# Altium footprint library chipfc_libs.PCBLIB: 315 footprints (part 15 of 20)
Each footprint in its own frame and in the unit in brackets; x right, y up, seen from the top. Pads: shape width x height; smd on the part's side, far side on the other; paste and mask are expansions set on the pad; w line width, h text height; cw(c..) or ccw(c..) is an arc to the next point about the centre after c.
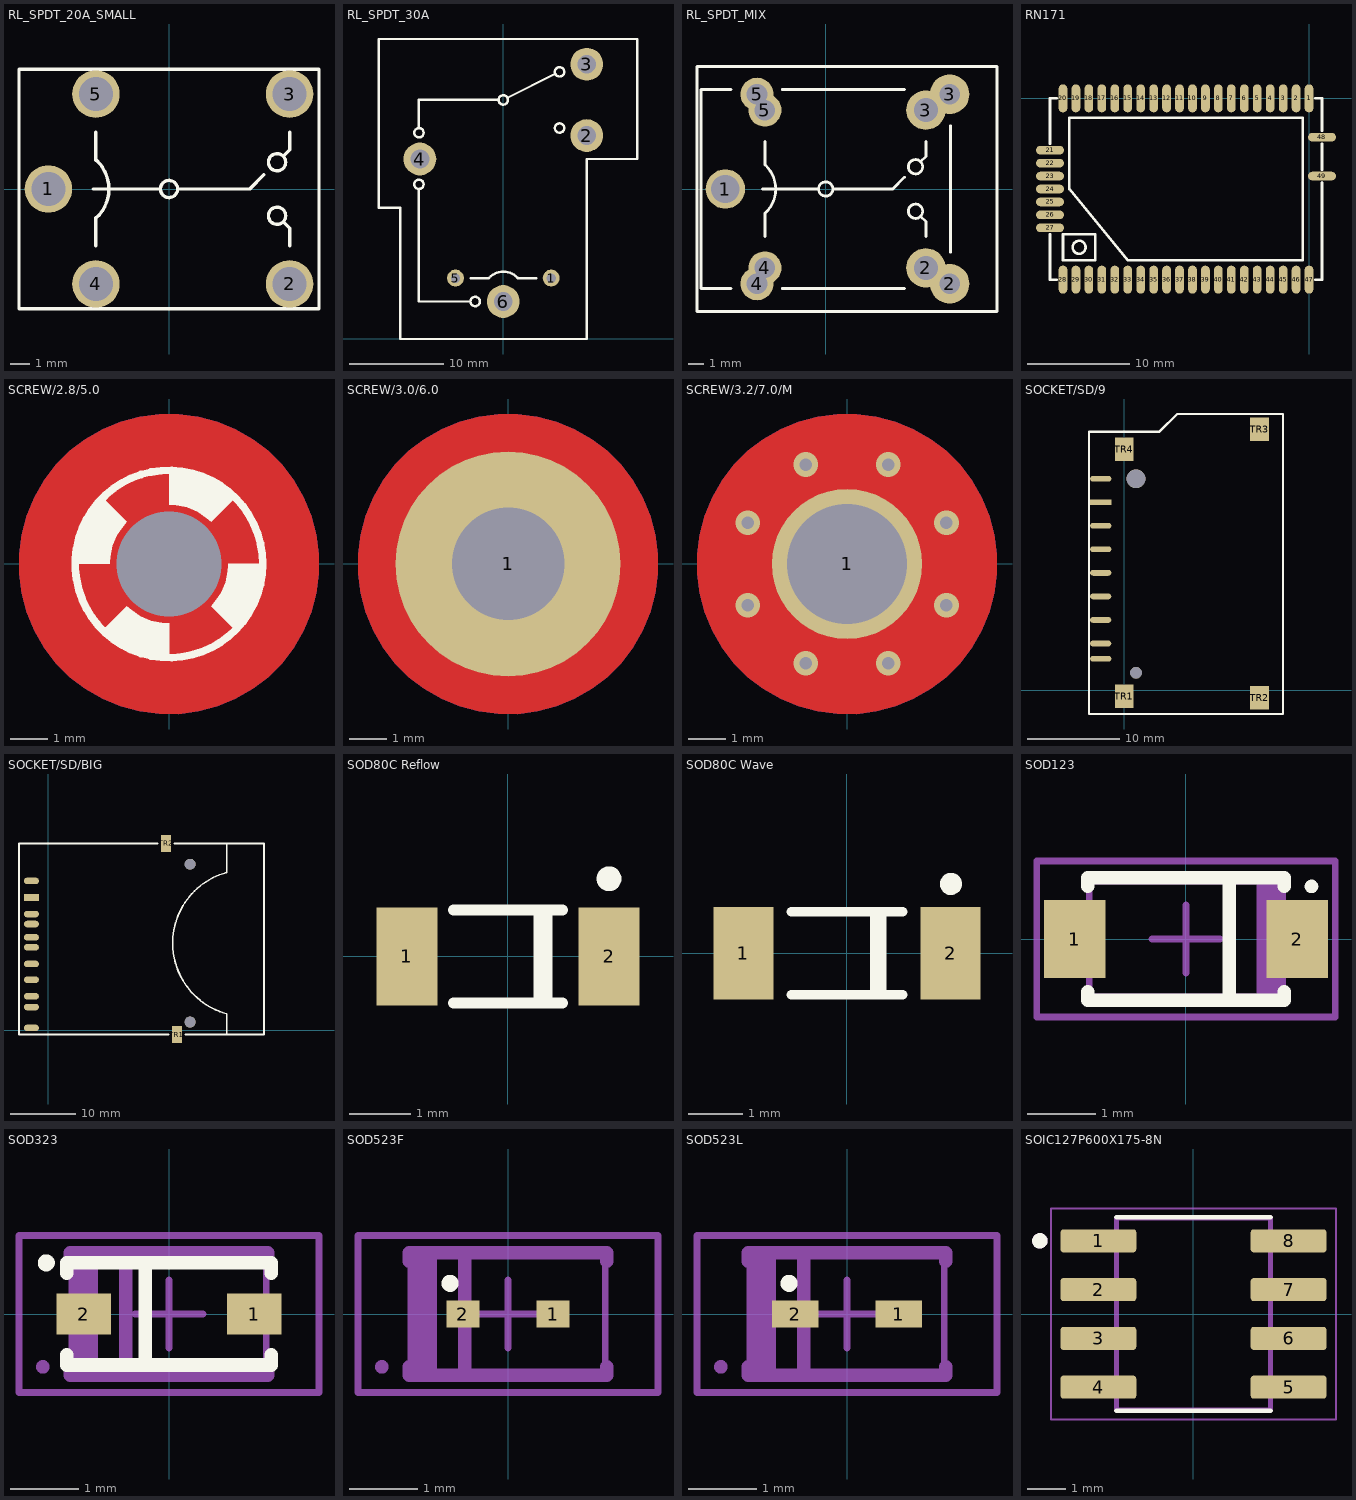
[diagram p14: the footprints below, top view; thin cyan lines are the x and y axes]

## RL_SPDT_20A_SMALL [mm]
height 20.32
pads (5):
  round 2.5 hole 1.8: 1(-6.35,0) 2(6.35,-5) 3(6.35,5) 4(-3.85,-5) 5(-3.85,5)
Top Overlay:
  circle w0.178: c5.69,1.409 r0.452
  circle w0.178: c5.69,-1.409 r0.452
  circle w0.178: c0,0 r0.452
  lines w0.178: -4,0 -0.45,0 ; -3.85,-3 -3.85,-1.523 ; -3.85,1.523 -3.85,3 ; -3.828,-1.523 ccw(c-5.25,0) -3.817,1.513 ; 0.45,0 4.25,0 5,0.75 ; 6.015,-1.735 6.35,-2.07 6.35,-3 ; 6.015,1.735 6.35,2.07 6.35,3 ; -7.9,-6.3 7.9,-6.3 7.9,6.3 -7.9,6.3 -7.9,-6.3
3D body "SRA-05VDC-CL.stp": height 13.5, standoff -5, extent -7.75,-6.15 7.75,6.15

## RL_SPDT_30A [mm] "Relay SPDT, 5 pin, 10A,W 650mil, L 800mil, H 800mil"
height 20.32
pads (6):
  round 1.8 hole 1: 1(5.1,6.5) 5(-5.1,6.5)
  round 3.5 hole 2: 2(8.9,21.7) 3(8.9,29.3) 4(-8.9,19.2) 6(0,4)
Top Overlay:
  circle w0.254: c6,22.5 r0.5
  circle w0.254: c0,25.5 r0.5
  circle w0.254: c6,28.5 r0.5
  circle w0.254: c-3,4 r0.5
  circle w0.254: c-9,16.5 r0.5
  circle w0.254: c-9,22 r0.5
  lines w0.254: -9,16 -9,4 -3.5,4 ; -9,22.5 -9,25.5 -0.5,25.5 ; -3.5,6.5 -1.523,6.5 ; -1.513,6.533 cw(c0,5.1) 1.523,6.522 ; 0.5,25.75 5.5,28.25 ; 1.523,6.5 3.5,6.5 ; -13.3,14 -13.3,32 14.3,32 14.3,19.2 8.9,19.2 8.9,0 -11,0 -11,14 -13.3,14
3D body "User Library-Releu Songle.step": height 20.06, standoff -4, extent -13.5,0 13.5,32

## RL_SPDT_MIX [mm]
height 20.32
pads (9):
  round 2.5 hole 1.8: 1(-6.35,0)
  round 2.5 hole 1.5: 2(6.35,-5) 3(6.35,5)
  round 2.5 hole 1.3: 2(7.85,-6) 3(7.85,6)
  round 2.1 hole 1.3: 4(-4.35,-6) 4(-3.85,-5) 5(-4.35,6) 5(-3.85,5)
Top Overlay:
  circle w0.178: c5.69,1.409 r0.452
  circle w0.178: c5.69,-1.409 r0.452
  circle w0.178: c0,0 r0.452
  lines w0.178: -6,-6.3 -7.9,-6.3 -7.9,6.3 -6,6.3 ; -4,0 -0.45,0 ; -3.85,-3 -3.85,-1.523 ; -3.85,1.523 -3.85,3 ; -3.828,-1.523 ccw(c-5.25,0) -3.817,1.513 ; -2.75,-6.3 5,-6.3 ; -2.75,6.3 5,6.3 ; 0.45,0 4.25,0 5,0.75 ; 6.015,-1.735 6.35,-2.07 6.35,-3 ; 6.015,1.735 6.35,2.07 6.35,3 ; 7.9,-4 7.9,4 ; -8.15,-7.75 -8.15,7.75 10.85,7.75 10.85,-7.75 -8.15,-7.75
3D body "SRA-05VDC-CL.stp": height 13.5, standoff -5, extent -7.75,-6.15 7.75,6.15
3D body "User Library-Relay SPDT.step": height 15.4, standoff -4, extent -8.15,-7.75 10.85,7.75

## RN171 [mm] "RN-171 802.11 b/g Wireless LAN Module"
height 3.2
pads (49):
  oval 0.85x2.75 smd: 1(0,0) 2(-1.27,0) 3(-2.54,0) 4(-3.81,0) 5(-5.08,0) 6(-6.35,0) 7(-7.62,0) 8(-8.89,0) 9(-10.16,0) 10(-11.43,0) 11(-12.7,0) 12(-13.97,0) 13(-15.24,0) 14(-16.51,0) 15(-17.78,0) 16(-19.05,0) 17(-20.32,0) 18(-21.59,0) 19(-22.86,0) 20(-24.13,0) 28(-24.13,-17.78) 29(-22.86,-17.78) 30(-21.59,-17.78) 31(-20.32,-17.78) 32(-19.05,-17.78) 33(-17.78,-17.78) 34(-16.51,-17.78) 35(-15.24,-17.78) 36(-13.97,-17.78) 37(-12.7,-17.78) 38(-11.43,-17.78) 39(-10.16,-17.78) 40(-8.89,-17.78) 41(-7.62,-17.78) 42(-6.35,-17.78) 43(-5.08,-17.78) 44(-3.81,-17.78) 45(-2.54,-17.78) 46(-1.27,-17.78) 47(0,-17.78)
  oval 2.75x0.85 smd: 21(-25.4,-5.08) 22(-25.4,-6.35) 23(-25.4,-7.62) 24(-25.4,-8.89) 25(-25.4,-10.16) 26(-25.4,-11.43) 27(-25.4,-12.7) 48(1.27,-3.81) 49(1.27,-7.62)
Top Overlay:
  circle w0.254: c-22.543,-14.605 r0.635
  lines w0.254: -25.4,-13.335 -25.4,-17.78 -24.765,-17.78 ; -25.4,-4.445 -25.4,0 -24.765,0 ; 0.635,-17.78 1.27,-17.78 1.27,-8.255 ; 0.635,0 1.27,0 1.27,-3.175 ; 1.27,-6.985 1.27,-4.445 ; -24.13,-15.875 -20.955,-15.875 -20.955,-13.335 -24.13,-13.335 -24.13,-13.97 -24.13,-15.875 ; -23.495,-8.89 -23.495,-1.905 -0.635,-1.905 -0.635,-15.875 -17.78,-15.875 -23.495,-8.89
3D body "User Library-RN-171.step": height 4.39, standoff -0.3, extent -25.4,-17.78 1.27,0

## SCREW/2.8/5.0 [mm]
pads (1):
  round 0 hole 2.8 unplated: 1(0,0)
Top Layer:
  pour cut-out: -4,0 -4,0.262 -3.932,0.782 -3.796,1.289 -3.595,1.773 -3.333,2.227 -3.014,2.643 -2.643,3.014 -2.227,3.333 -1.773,3.595 -1.289,3.796 -0.782,3.931 -0.262,4 0,4 0.262,4 0.782,3.932 1.288,3.796 1.773,3.595 2.227,3.333 2.643,3.014 3.014,2.643 3.333,2.227 3.595,1.773 3.796,1.288 3.932,0.782 4,0.262 4,0 4,-0.262 3.932,-0.782 3.796,-1.289 3.595,-1.773 3.333,-2.227 3.014,-2.643 2.643,-3.014 2.227,-3.333 1.773,-3.595 1.289,-3.796 0.782,-3.932 0.262,-4 0,-4 -0.262,-4 -0.782,-3.932 -1.288,-3.796 -1.773,-3.595 -2.227,-3.333 -2.643,-3.014 -3.014,-2.643 -3.333,-2.227 -3.595,-1.773 -3.796,-1.289 -3.932,-0.782 -4,-0.262
Bottom Layer:
  pour cut-out: -4,0 -4,0.262 -3.932,0.782 -3.796,1.289 -3.595,1.773 -3.333,2.227 -3.014,2.643 -2.643,3.014 -2.227,3.333 -1.773,3.595 -1.289,3.796 -0.782,3.931 -0.262,4 0,4 0.262,4 0.782,3.932 1.288,3.796 1.773,3.595 2.227,3.333 2.643,3.014 3.014,2.643 3.333,2.227 3.595,1.773 3.796,1.288 3.932,0.782 4,0.262 4,0 4,-0.262 3.932,-0.782 3.796,-1.289 3.595,-1.773 3.333,-2.227 3.014,-2.643 2.643,-3.014 2.227,-3.333 1.773,-3.595 1.289,-3.796 0.782,-3.932 0.262,-4 0,-4 -0.262,-4 -0.782,-3.932 -1.288,-3.796 -1.773,-3.595 -2.227,-3.333 -2.643,-3.014 -3.014,-2.643 -3.333,-2.227 -3.595,-1.773 -3.796,-1.289 -3.932,-0.782 -4,-0.262
Top Overlay:
  circle w0.203: c0,0 r2.5
  region: 2.5,0 2.5,-0.025 2.5,-0.268 2.405,-0.747 2.218,-1.197 1.947,-1.603 1.775,-1.775 1.125,-1.125 1.226,-1.013 1.394,-0.763 1.509,-0.485 1.568,-0.189 1.575,-0.039 1.575,0
  region: 0,-2.5 -0.025,-2.5 -0.268,-2.5 -0.747,-2.405 -1.197,-2.218 -1.603,-1.947 -1.775,-1.775 -1.125,-1.125 -1.013,-1.226 -0.763,-1.394 -0.485,-1.509 -0.189,-1.568 -0.039,-1.575 0,-1.575
  region: -2.5,0 -2.5,0.025 -2.5,0.268 -2.405,0.747 -2.218,1.197 -1.947,1.603 -1.775,1.775 -1.125,1.125 -1.226,1.013 -1.394,0.763 -1.509,0.485 -1.568,0.189 -1.575,0.039 -1.575,0
  region: 0,2.5 0.025,2.5 0.268,2.5 0.747,2.405 1.197,2.218 1.603,1.947 1.775,1.775 1.125,1.125 1.013,1.226 0.763,1.394 0.485,1.509 0.189,1.568 0.039,1.575 0,1.575
Bottom Overlay:
  circle w0.203: c0,0 r2.5
  region: -2.5,0 -2.5,-0.025 -2.5,-0.268 -2.405,-0.747 -2.218,-1.197 -1.947,-1.603 -1.775,-1.775 -1.125,-1.125 -1.226,-1.013 -1.394,-0.763 -1.509,-0.485 -1.568,-0.189 -1.575,-0.039 -1.575,0
  region: 0,2.5 -0.025,2.5 -0.268,2.5 -0.747,2.405 -1.197,2.218 -1.603,1.947 -1.775,1.775 -1.125,1.125 -1.013,1.226 -0.763,1.394 -0.485,1.509 -0.189,1.568 -0.039,1.575 0,1.575
  region: 2.5,0 2.5,0.025 2.5,0.268 2.405,0.747 2.218,1.197 1.947,1.603 1.775,1.775 1.125,1.125 1.226,1.013 1.394,0.763 1.509,0.485 1.568,0.189 1.575,0.039 1.575,0
  region: 0,-2.5 0.025,-2.5 0.268,-2.5 0.747,-2.405 1.197,-2.218 1.603,-1.947 1.775,-1.775 1.125,-1.125 1.013,-1.226 0.763,-1.394 0.485,-1.509 0.189,-1.568 0.039,-1.575 0,-1.575

## SCREW/3.0/6.0 [mm]
pads (1):
  round 6 hole 3: 1(0,0)
Top Layer:
  pour cut-out: -4,0 -4,0.262 -3.932,0.782 -3.796,1.289 -3.595,1.773 -3.333,2.227 -3.014,2.643 -2.643,3.014 -2.227,3.333 -1.773,3.595 -1.289,3.796 -0.782,3.931 -0.262,4 0,4 0.262,4 0.782,3.932 1.288,3.796 1.773,3.595 2.227,3.333 2.643,3.014 3.014,2.643 3.333,2.227 3.595,1.773 3.796,1.288 3.932,0.782 4,0.262 4,0 4,-0.262 3.932,-0.782 3.796,-1.289 3.595,-1.773 3.333,-2.227 3.014,-2.643 2.643,-3.014 2.227,-3.333 1.773,-3.595 1.289,-3.796 0.782,-3.932 0.262,-4 0,-4 -0.262,-4 -0.782,-3.932 -1.288,-3.796 -1.773,-3.595 -2.227,-3.333 -2.643,-3.014 -3.014,-2.643 -3.333,-2.227 -3.595,-1.773 -3.796,-1.289 -3.932,-0.782 -4,-0.262
Bottom Layer:
  pour cut-out: -4,0 -4,0.262 -3.932,0.782 -3.796,1.289 -3.595,1.773 -3.333,2.227 -3.014,2.643 -2.643,3.014 -2.227,3.333 -1.773,3.595 -1.289,3.796 -0.782,3.931 -0.262,4 0,4 0.262,4 0.782,3.932 1.288,3.796 1.773,3.595 2.227,3.333 2.643,3.014 3.014,2.643 3.333,2.227 3.595,1.773 3.796,1.288 3.932,0.782 4,0.262 4,0 4,-0.262 3.932,-0.782 3.796,-1.289 3.595,-1.773 3.333,-2.227 3.014,-2.643 2.643,-3.014 2.227,-3.333 1.773,-3.595 1.289,-3.796 0.782,-3.932 0.262,-4 0,-4 -0.262,-4 -0.782,-3.932 -1.288,-3.796 -1.773,-3.595 -2.227,-3.333 -2.643,-3.014 -3.014,-2.643 -3.333,-2.227 -3.595,-1.773 -3.796,-1.289 -3.932,-0.782 -4,-0.262

## SCREW/3.2/7.0/M [mm]
pads (1):
  round 4 / inner round 7 / far side round 7 hole 3.2: 1(0,0)
via -1.1,-2.65 diameter 0.66 hole 0.33
via 2.65,-1.1 diameter 0.66 hole 0.33
via 1.1,2.65 diameter 0.66 hole 0.33
via -2.65,1.1 diameter 0.66 hole 0.33
via 2.65,1.1 diameter 0.66 hole 0.33
via -1.1,2.65 diameter 0.66 hole 0.33
via -2.65,-1.1 diameter 0.66 hole 0.33
via 1.1,-2.65 diameter 0.66 hole 0.33
Top Layer:
  pour cut-out: -4,0 -4,0.262 -3.932,0.782 -3.796,1.289 -3.595,1.773 -3.333,2.227 -3.014,2.643 -2.643,3.014 -2.227,3.333 -1.773,3.595 -1.289,3.796 -0.782,3.931 -0.262,4 0,4 0.262,4 0.782,3.932 1.288,3.796 1.773,3.595 2.227,3.333 2.643,3.014 3.014,2.643 3.333,2.227 3.595,1.773 3.796,1.288 3.932,0.782 4,0.262 4,0 4,-0.262 3.932,-0.782 3.796,-1.289 3.595,-1.773 3.333,-2.227 3.014,-2.643 2.643,-3.014 2.227,-3.333 1.773,-3.595 1.289,-3.796 0.782,-3.932 0.262,-4 0,-4 -0.262,-4 -0.782,-3.932 -1.288,-3.796 -1.773,-3.595 -2.227,-3.333 -2.643,-3.014 -3.014,-2.643 -3.333,-2.227 -3.595,-1.773 -3.796,-1.289 -3.932,-0.782 -4,-0.262
  region: -0.1,-2.25 -0.325,-2.225 -0.575,-2.175 -0.8,-2.1 -0.975,-2.025 -1.125,-1.95 -1.25,-1.875 -1.375,-1.775 -1.5,-1.675 -2.425,-2.6 -2.225,-2.775 -2.025,-2.925 -1.825,-3.05 -1.6,-3.175 -1.375,-3.275 -1.175,-3.35 -0.95,-3.425 -0.725,-3.475 -0.6,-3.5 -0.45,-3.525 -0.1,-3.55
  region: 0.1,-2.25 0.325,-2.225 0.575,-2.175 0.8,-2.1 0.975,-2.025 1.125,-1.95 1.25,-1.875 1.375,-1.775 1.5,-1.675 2.425,-2.6 2.225,-2.775 2.025,-2.925 1.825,-3.05 1.6,-3.175 1.375,-3.275 1.175,-3.35 0.95,-3.425 0.725,-3.475 0.6,-3.5 0.45,-3.525 0.1,-3.55
  region: 2.25,0.1 2.225,0.325 2.175,0.575 2.1,0.8 2.025,0.975 1.95,1.125 1.875,1.25 1.775,1.375 1.675,1.5 2.6,2.425 2.775,2.225 2.925,2.025 3.05,1.825 3.175,1.6 3.275,1.375 3.35,1.175 3.425,0.95 3.475,0.725 3.5,0.6 3.525,0.45 3.55,0.1
  region: 2.25,-0.1 2.225,-0.325 2.175,-0.575 2.1,-0.8 2.025,-0.975 1.95,-1.125 1.875,-1.25 1.775,-1.375 1.675,-1.5 2.6,-2.425 2.775,-2.225 2.925,-2.025 3.05,-1.825 3.175,-1.6 3.275,-1.375 3.35,-1.175 3.425,-0.95 3.475,-0.725 3.5,-0.6 3.525,-0.45 3.55,-0.1
  region: 0.1,2.25 0.325,2.225 0.575,2.175 0.8,2.1 0.975,2.025 1.125,1.95 1.25,1.875 1.375,1.775 1.5,1.675 2.425,2.6 2.225,2.775 2.025,2.925 1.825,3.05 1.6,3.175 1.375,3.275 1.175,3.35 0.95,3.425 0.725,3.475 0.6,3.5 0.45,3.525 0.1,3.55
  region: -0.1,2.25 -0.325,2.225 -0.575,2.175 -0.8,2.1 -0.975,2.025 -1.125,1.95 -1.25,1.875 -1.375,1.775 -1.5,1.675 -2.425,2.6 -2.225,2.775 -2.025,2.925 -1.825,3.05 -1.6,3.175 -1.375,3.275 -1.175,3.35 -0.95,3.425 -0.725,3.475 -0.6,3.5 -0.45,3.525 -0.1,3.55
  region: -2.25,-0.1 -2.225,-0.325 -2.175,-0.575 -2.1,-0.8 -2.025,-0.975 -1.95,-1.125 -1.875,-1.25 -1.775,-1.375 -1.675,-1.5 -2.6,-2.425 -2.775,-2.225 -2.925,-2.025 -3.05,-1.825 -3.175,-1.6 -3.275,-1.375 -3.35,-1.175 -3.425,-0.95 -3.475,-0.725 -3.5,-0.6 -3.525,-0.45 -3.55,-0.1
  region: -2.25,0.1 -2.225,0.325 -2.175,0.575 -2.1,0.8 -2.025,0.975 -1.95,1.125 -1.875,1.25 -1.775,1.375 -1.675,1.5 -2.6,2.425 -2.775,2.225 -2.925,2.025 -3.05,1.825 -3.175,1.6 -3.275,1.375 -3.35,1.175 -3.425,0.95 -3.475,0.725 -3.5,0.6 -3.525,0.45 -3.55,0.1
Bottom Layer:
  pour cut-out: -4,0 -4,0.262 -3.932,0.782 -3.796,1.289 -3.595,1.773 -3.333,2.227 -3.014,2.643 -2.643,3.014 -2.227,3.333 -1.773,3.595 -1.289,3.796 -0.782,3.931 -0.262,4 0,4 0.262,4 0.782,3.932 1.288,3.796 1.773,3.595 2.227,3.333 2.643,3.014 3.014,2.643 3.333,2.227 3.595,1.773 3.796,1.288 3.932,0.782 4,0.262 4,0 4,-0.262 3.932,-0.782 3.796,-1.289 3.595,-1.773 3.333,-2.227 3.014,-2.643 2.643,-3.014 2.227,-3.333 1.773,-3.595 1.289,-3.796 0.782,-3.932 0.262,-4 0,-4 -0.262,-4 -0.782,-3.932 -1.288,-3.796 -1.773,-3.595 -2.227,-3.333 -2.643,-3.014 -3.014,-2.643 -3.333,-2.227 -3.595,-1.773 -3.796,-1.289 -3.932,-0.782 -4,-0.262
Top Solder:
  region: 3.6,-0.017 3.6,-0.252 3.539,-0.717 3.417,-1.171 3.237,-1.605 3.003,-2.012 2.717,-2.384 2.385,-2.717 2.012,-3.003 1.605,-3.237 1.171,-3.417 0.717,-3.539 0.252,-3.6 0.017,-3.6 -0.22,-3.6 -0.69,-3.538 -1.148,-3.416 -1.586,-3.234 -1.997,-2.997 -2.373,-2.709 -2.708,-2.374 -2.997,-1.997 -3.234,-1.587 -3.415,-1.149 -3.538,-0.691 -3.6,-0.221 -3.6,0.016 -3.6,0.252 -3.538,0.719 -3.416,1.174 -3.235,1.609 -2.999,2.017 -2.711,2.39 -2.377,2.722 -2.003,3.008 -1.594,3.243 -1.158,3.421 -0.702,3.542 -0.235,3.601 0.001,3.6 0.237,3.599 0.706,3.535 1.162,3.411 1.598,3.228 2.006,2.991 2.38,2.702 2.714,2.367 3.001,1.991 3.236,1.582 3.417,1.145 3.539,0.688 3.6,0.219

## SOCKET/SD/9 [mil]
pads (15):
  rect 90x25 smd: 1(-100,800)
  oval 90x25 smd: 2(-100,700) 3(-100,600) 4(-100,500) 5(-100,400) 6(-100,300) 7(-100,200) 8(-100,135) 9(-100,900)
  round 80 / inner round 60 / far side round 80 hole 80: HOLD1(50,900)
  round 50 / inner round 60 / far side round 50 hole 50: HOLD2(50,75)
  rect 80x100 smd: TR1(0,-25) TR2(575,-30) TR3(575,1110) TR4(0,1025)
Top Overlay:
  lines w10: -150,-100 -150,1100 150,1100 225,1175 675,1175 675,-100 -150,-100
  text ".Designator" at 75,662.5 h56.25
Mechanical 1:
  text ".Comment" at 0,225 h56.25
  text ".Designator" at 0,337.5 h56.25
  text ".Pattern" at 0,0 h56.25

## SOCKET/SD/BIG [mil]
pads (15):
  rect 90x40 smd: 1(-100,800)
  oval 90x40 smd: 2(-100,700) 3(-100,560) 4(-100,500) 5(-100,400) 6(-100,305) 7(-100,205) 8(-100,140) 9(-100,900) 10(-100,15) 11(-100,640)
  round 65 / inner round 60 / far side round 65 hole 65: HOLD1(855,50) HOLD2(855,1000)
  rect 60x100 smd: TR1(775,-25) TR2(710,1125)
Top Overlay:
  lines w10: 660,1125 -175,1125 ; 725,-25 -175,-25 ; 760,1125 1300,1125 1300,-25 825,-25 ; 1075,-25 1075,100 cw(c1190.38,525) 1075,950 1075,1125 ; -175,-25 -175,1125 ; -175,-25 700,-25 -175,-25 ; -175,-25 -175,1125 ; -175,-25 -175,1125 ; -175,1125 650,1125 -175,1125
  text ".Designator" at 195,467.5 h56.25

## SOD80C Reflow [mm]
pads (2):
  rect 1x1.6 smd: 1(-1.65,0) 2(1.65,0)
Top Overlay:
  circle w0.203: c1.651,1.27 r0.102
  lines w0.178: -0.889,-0.762 0.889,-0.762 ; -0.889,0.762 0.889,0.762 ; 0.508,-0.762 0.508,0.762 ; 0.635,-0.762 0.635,0.762
3D body "User Library-sod80-1-mini-melf-LL4148.step": height 1.44, standoff -0.01, extent -1.75,-0.725 1.75,0.725

## SOD80C Wave [mm]
pads (2):
  rect 1.1x1.7 smd: 1(-1.9,0) 2(1.9,0)
Top Overlay:
  circle w0.203: c1.905,1.27 r0.102
  lines w0.178: -1.016,-0.762 1.016,-0.762 ; -1.016,0.762 1.016,0.762 ; 0.508,-0.762 0.508,0.762 ; 0.635,-0.762 0.635,0.762
3D body "User Library-sod80-1-mini-melf-LL4148.step": height 1.44, standoff -0.01, extent -1.75,-0.725 1.75,0.725

## SOD123 [mm] "Molded Diode, 2-Leads, Body 2.7x1.6mm, IPC Medium Density"
height 1.35
pads (2):
  rect 0.91x1.143 smd: 1(-1.64,0) 2(1.64,0)
Top Overlay:
  circle w0.1: c1.85,0.775 r0.05
  lines w0.2: -1.45,-0.775 -1.45,-0.9 1.45,-0.9 1.45,-0.775 ; -1.45,0.775 -1.45,0.9 1.45,0.9 1.45,0.775 ; 0.635,-0.889 0.635,0.889
Mechanical 13:
  rectangle: 1.042,-0.85 1.425,0.85
  lines w0.1: -1.425,-0.85 -1.425,0.85 1.425,0.85 1.425,-0.85 -1.425,-0.85
Mechanical 15:
  lines w0.1: -0.5,0 0.5,0 ; 0,-0.5 0,0.5 ; -2.2,-1.15 -2.2,1.15 2.2,1.15 2.2,-1.15 -2.2,-1.15
3D body "User Library-SOD3716X14.step": height 1.35, standoff 0, extent -1.85,-0.775 1.85,0.775

## SOD323 [mm]
pads (2):
  rect 0.8x0.6 smd: 1(1.25,0) 2(-1.25,0)
Top Overlay:
  circle w0.15: c-1.8,0.75 r0.05
  lines w0.2: -1.5,-0.75 -1.5,-0.6 ; -1.5,0.6 -1.5,0.75 1.5,0.75 1.5,0.6 ; -0.35,-0.75 -0.35,0.75 ; 1.5,-0.75 1.5,-0.6
  lines w0.203: -1.5,-0.75 1.5,-0.75
Mechanical 13:
  region: -1.042,0.85 -1.425,0.85 -1.425,-0.85 -1.042,-0.85
  lines w0.1: -1.425,-0.85 -1.425,0.85 1.425,0.85 1.425,-0.85 -1.425,-0.85
Mechanical 15:
  lines w0.1: -0.5,0 0.5,0 ; 0,-0.5 0,0.5 ; -2.2,-1.15 -2.2,1.15 2.2,1.15 2.2,-1.15 -2.2,-1.15
Mechanical 31:
  circle w0.1: c-1.85,-0.775 r0.05
  lines w0.2: -1.45,-0.775 -1.45,-0.9 1.45,-0.9 1.45,-0.775 ; -1.45,0.775 -1.45,0.9 1.45,0.9 1.45,0.775 ; -0.635,-0.889 -0.635,0.889
3D body "User Library-SOD323-1.step": height 1.1, standoff 0, extent -1.3,-0.675 1.3,0.675

## SOD523F [mm]
pads (2):
  rect 0.48x0.4 smd: 1(0.66,0) 2(-0.66,0)
Top Overlay:
  circle w0.15: c-0.85,0.45 r0.05
Mechanical 13:
  region: -1.042,0.85 -1.425,0.85 -1.425,-0.85 -1.042,-0.85
  lines w0.1: -1.425,-0.85 1.425,-0.85 1.425,0.85 -1.425,0.85 -1.425,-0.85
Mechanical 15:
  lines w0.1: -0.5,0 0.5,0 ; 0,-0.5 0,0.5 ; -2.2,-1.15 -2.2,1.15 2.2,1.15 2.2,-1.15 -2.2,-1.15
Mechanical 31:
  circle w0.1: c-1.85,-0.775 r0.05
  lines w0.2: -1.45,-0.775 -1.45,-0.9 1.45,-0.9 1.45,-0.775 ; -1.45,0.775 -1.45,0.9 1.45,0.9 1.45,0.775 ; -0.635,-0.889 -0.635,0.889
3D body "User Library-SOD523F.step": height 0.7, standoff 0, extent -0.85,-0.45 0.85,0.45

## SOD523L [mm]
pads (2):
  rect 0.68x0.4 smd: 1(0.76,0) 2(-0.76,0)
Top Overlay:
  circle w0.15: c-0.85,0.45 r0.05
Mechanical 13:
  region: -1.042,0.85 -1.425,0.85 -1.425,-0.85 -1.042,-0.85
  lines w0.1: -1.425,-0.85 -1.425,0.85 1.425,0.85 1.425,-0.85 -1.425,-0.85
Mechanical 15:
  lines w0.1: -0.5,0 0.5,0 ; 0,-0.5 0,0.5 ; -2.2,-1.15 2.2,-1.15 2.2,1.15 -2.2,1.15 -2.2,-1.15
Mechanical 31:
  circle w0.1: c-1.85,-0.775 r0.05
  lines w0.2: -1.45,-0.775 -1.45,-0.9 1.45,-0.9 1.45,-0.775 ; -1.45,0.775 -1.45,0.9 1.45,0.9 1.45,0.775 ; -0.635,-0.889 -0.635,0.889
3D body "User Library-SOD523F.step": height 0.7, standoff 0, extent -0.85,-0.45 0.85,0.45

## SOIC127P600X175-8N [mm]
pads (8):
  rrect25% 1.97x0.6 smd: 1(-2.475,1.905) 2(-2.475,0.635) 3(-2.475,-0.635) 4(-2.475,-1.905) 5(2.475,-1.905) 6(2.475,-0.635) 7(2.475,0.635) 8(2.475,1.905)
Top Overlay:
  circle w0.2: c-4,1.905 r0.1
  lines w0.127: -2,-2.519 2,-2.519 ; -2,2.519 2,2.519
Mechanical 13:
  circle w0.2: c-4,1.905 r0.1
  lines w0.127: -2,-2.5 -2,2.5 2,2.5 2,-2.5 -2,-2.5
Mechanical 15:
  lines w0.05: -3.71,-2.75 -3.71,2.75 3.71,2.75 3.71,-2.75 -3.71,-2.75
3D body "SOIC127P600X175-8N.step": height 1.75, standoff 0, extent -3,-2.45 3,2.45